# Altium integrated library 74HC245D.IntLib: 1 symbol
Pins are listed as number, name and electrical type; pins without a type are passive.

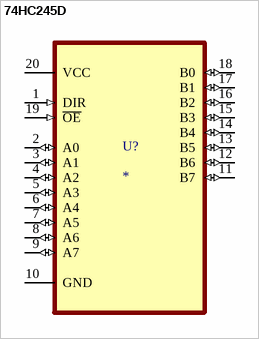
[diagram p0: symbol 74HC245D]

## 74HC245D
designator U?
Transceiver, Non-Inverting 1 Element 8 Bit per Element 3-State Output 20-SOIC; MP: 74HC245D; MF: Toshiba; SnapEDA_Link: https://www.snapeda.com/parts/74HC245D/Toshiba+Semiconductor+and+Storage/view-part/?ref=snap; Package: SOIC-20 Toshiba Semiconductor; Check_prices: https://www.snapeda.com/parts/74HC245D/Toshiba+Semiconductor+and+Storage/view-part/?ref=eda; Purchase-URL: https://pricing.snapeda.com/search/part/74HC245D/?ref=eda; Price: None; Value: *; Availability: In Stock
footprint SOIC127P1032X265-20N
pins: 1 DIR (in), 2 A0 (io), 3 A1 (io), 4 A2 (io), 5 A3 (io), 6 A4 (io), 7 A5 (io), 8 A6 (io), 9 A7 (io), 10 GND, 11 B7 (io), 12 B6 (io), 13 B5 (io), 14 B4 (io), 15 B3 (io), 16 B2 (io), 17 B1 (io), 18 B0 (io), 19 ~{OE} (in), 20 VCC (power)